# Altium footprint library SOP65P777X199-16N.PcbLib: 1 footprints
Each footprint in its own frame and in the unit in brackets; x right, y up, seen from the top. Pads: shape width x height; smd on the part's side, far side on the other; paste and mask are expansions set on the pad; w line width, h text height; cw(c..) or ccw(c..) is an arc to the next point about the centre after c.
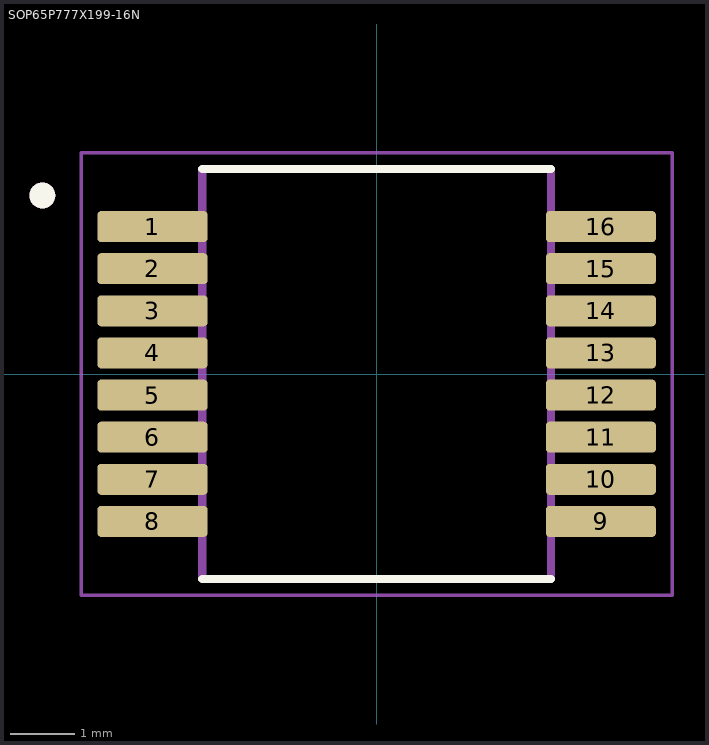
[diagram p0: the footprint, top view; thin cyan lines are the x and y axes]

## SOP65P777X199-16N [mm]
pads (16):
  rrect25% 1.7x0.48 smd paste+0 mask+0.102: 1(-3.46,2.275) 2(-3.46,1.625) 3(-3.46,0.975) 4(-3.46,0.325) 5(-3.46,-0.325) 6(-3.46,-0.975) 7(-3.46,-1.625) 8(-3.46,-2.275) 9(3.46,-2.275) 10(3.46,-1.625) 11(3.46,-0.975) 12(3.46,-0.325) 13(3.46,0.325) 14(3.46,0.975) 15(3.46,1.625) 16(3.46,2.275)
Top Overlay:
  circle w0.2: c-5.16,2.755 r0.1
  lines w0.127: -2.69,-3.165 2.69,-3.165 ; -2.69,3.165 2.69,3.165
Assembly Top:
  circle w0.2: c-5.16,2.755 r0.1
  lines w0.127: -2.69,-3.165 2.69,-3.165 2.69,3.165 -2.69,3.165 -2.69,-3.165
Courtyard Top:
  lines w0.05: -4.56,-3.415 4.56,-3.415 4.56,3.415 -4.56,3.415 -4.56,-3.415
3D body "step_temp.STEP": height 1.99, standoff 0, extent -3.888,-3.1 3.888,3.1